# Altium footprint library Footprints.PcbLib: 320 footprints (part 17 of 20)
Each footprint in its own frame and in the unit in brackets; x right, y up, seen from the top. Pads: shape width x height; smd on the part's side, far side on the other; paste and mask are expansions set on the pad; w line width, h text height; cw(c..) or ccw(c..) is an arc to the next point about the centre after c.
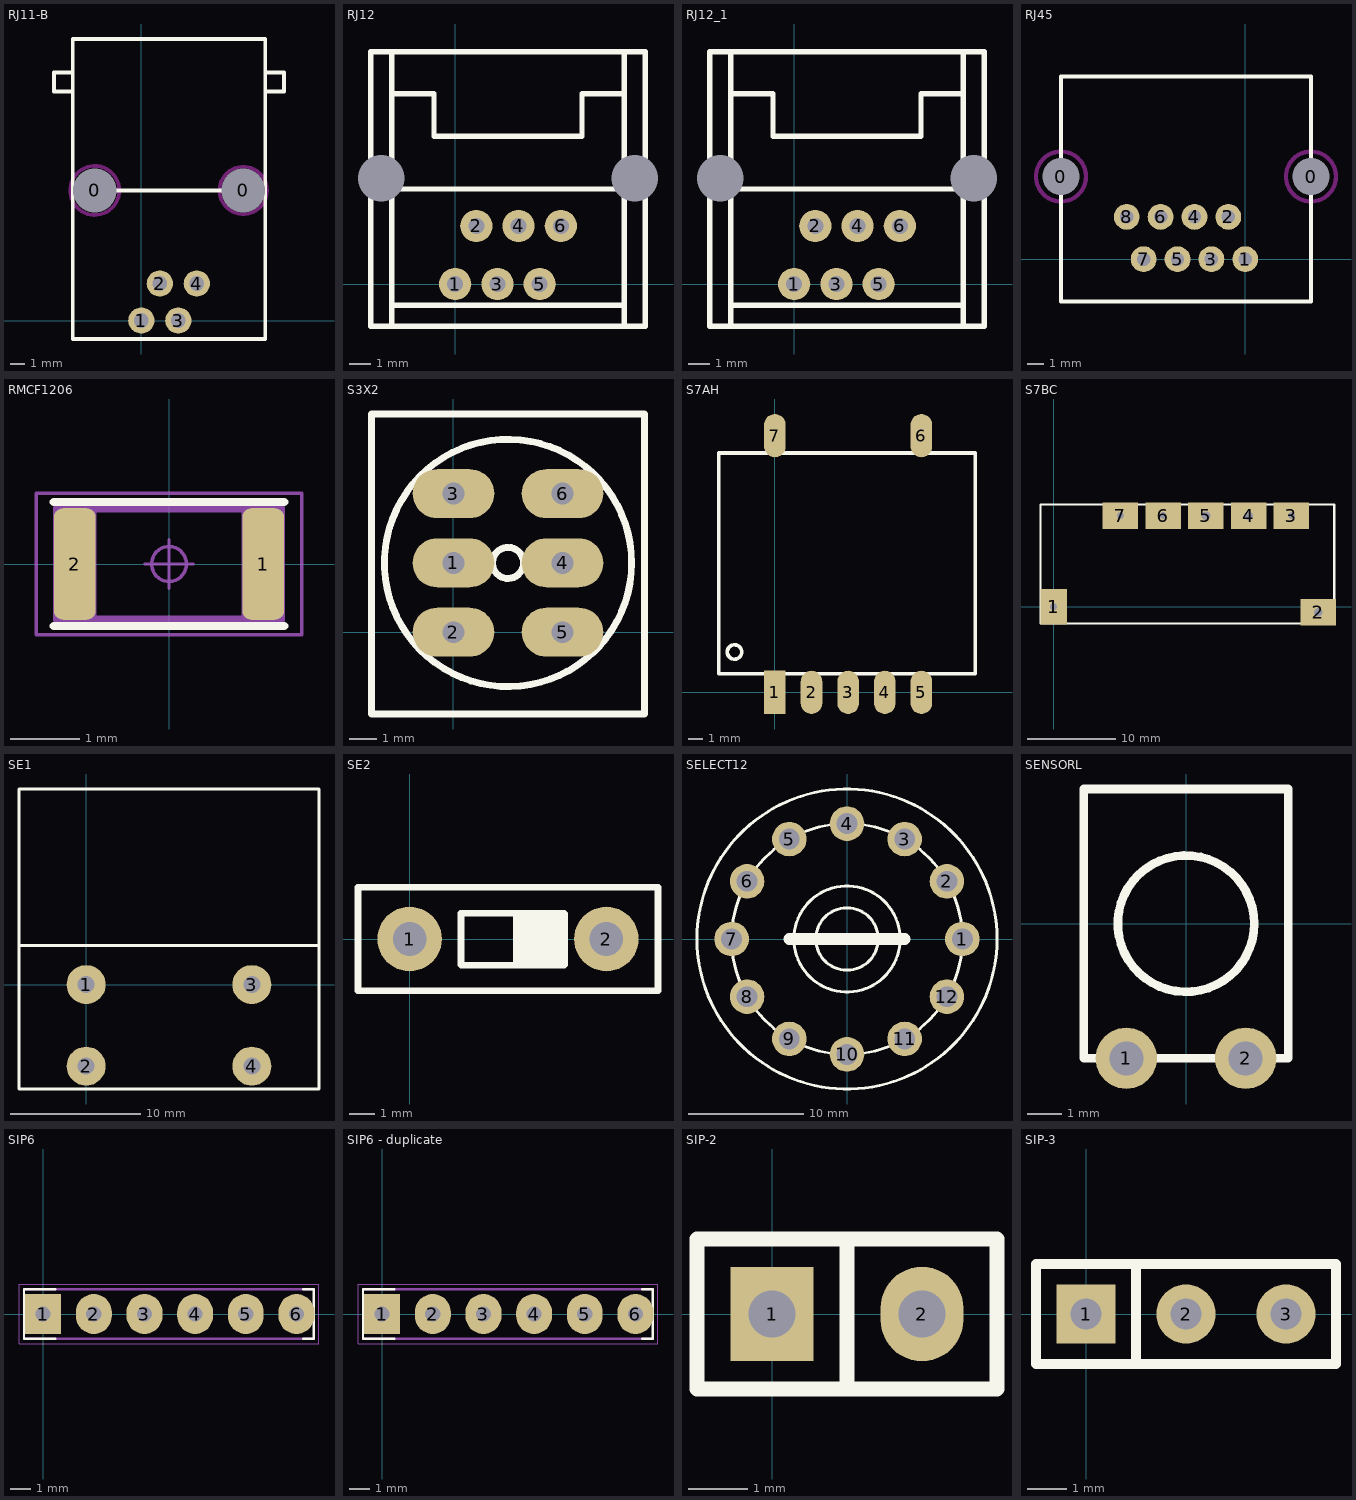
[diagram p16: the footprints below, top view; thin cyan lines are the x and y axes]

## RJ11-B [mm]
pads (6):
  round 2.5 hole 3: 0(-3.2,8.93) 0(7,8.93)
  round 1.8 hole 1: 1(0,0) 2(1.27,2.54) 3(2.54,0) 4(3.81,2.54)
Top Overlay:
  lines w0.254: -4.7,8.93 8.5,8.93 ; -4.7,15.73 -6,15.73 -6,17.03 -4.7,17.03 ; 8.5,15.73 9.8,15.73 9.8,17.03 8.5,17.03 ; -4.7,-1.27 8.5,-1.27 8.5,19.33 -4.7,19.33 -4.7,-1.27
Keep-Out Layer:
  circle w0.254: c7,8.93 r1.631
  circle w0.254: c-3.2,8.93 r1.687

## RJ12 [mil]
pads (8):
  round 60 hole 30: 1(0,0) 2(39.37,108.27) 3(78.74,0) 4(118.11,108.27) 5(157.48,0) 6(196.85,108.27)
  round 0 hole 86.61: ""(-137.8,196.85) ""(334.65,196.85)
Top Overlay:
  lines w10: -157.48,177.17 354.33,177.17 ; -118.11,-78.74 -118.11,433.07 ; -118.11,-39.37 314.96,-39.37 ; -118.11,354.33 -39.37,354.33 -39.37,275.59 236.22,275.59 236.22,354.33 314.96,354.33 ; 314.96,-78.74 314.96,433.07 ; -157.48,-78.74 354.33,-78.74 354.33,433.07 -157.48,433.07 -157.48,-78.74

## RJ12_1 [mil]
pads (8):
  round 60 hole 30: 1(0,0) 2(39.37,108.27) 3(78.74,0) 4(118.11,108.27) 5(157.48,0) 6(196.85,108.27)
  round 0 hole 86.61: ""(-137.8,196.85) ""(334.65,196.85)
Top Overlay:
  lines w10: -157.48,177.17 354.33,177.17 ; -118.11,-78.74 -118.11,433.07 ; -118.11,-39.37 314.96,-39.37 ; -118.11,354.33 -39.37,354.33 -39.37,275.59 236.22,275.59 236.22,354.33 314.96,354.33 ; 314.96,-78.74 314.96,433.07 ; -157.48,-78.74 -157.48,433.07 354.33,433.07 354.33,-78.74 -157.48,-78.74

## RJ45 [mm]
pads (10):
  round 1.524 hole 2.2: 0(-11.056,4.96) 0(3.944,4.96)
  round 1.55 hole 0.8: 1(0,0) 2(-1.016,2.54) 3(-2.032,0) 4(-3.048,2.54) 5(-4.064,0) 6(-5.08,2.54) 7(-6.096,0) 8(-7.112,2.54)
Top Overlay:
  lines w0.254: -11.056,-2.54 3.944,-2.54 3.944,10.96 -11.056,10.96 -11.056,-2.54
Keep-Out Layer:
  circle w0.254: c-11.056,4.96 r1.5
  circle w0.254: c3.944,4.96 r1.5

## RMCF1206 [mm] "Resistor, Chip;3.2mm L X 1.6mm W X 0.55mm, 0.25W H body"
height 0.55
pads (2):
  rrect43% 0.6x1.6 smd: 1(1.35,0) 2(-1.35,0)
Top Overlay:
  lines w0.12: -1.651,-0.889 1.651,-0.889 ; -1.651,0.889 1.651,0.889
Mechanical 13:
  lines w0.12: -1.1,-0.8 -1.1,0.8 ; 1.1,-0.8 1.1,0.8 ; -1.6,-0.8 -1.6,0.8 1.6,0.8 1.6,-0.8 -1.6,-0.8
Mechanical 15:
  circle w0.05: c0,0 r0.25
  lines w0.05: -0.35,0 0.35,0 ; 0,-0.35 0,0.35 ; -1.905,-1.016 -1.905,1.016 1.905,1.016 1.905,-1.016 -1.905,-1.016
3D body: height 0.56, standoff 0, extent 1.101,-0.799 1.599,0.799
3D body: height 0.56, standoff 0, extent -1.599,-0.799 -1.101,0.799
3D body: height 0.55, standoff 0, extent -1.099,-0.799 1.099,0.799

## S3X2 [mm]
pads (6):
  oval 3x1.8 hole 0.8: 1(0,2.54) 2(0,0) 3(0,5.08) 4(4,2.54) 5(4,0) 6(4,5.08)
Top Overlay:
  circle w0.254: c2,2.54 r0.57
  circle w0.254: c2,2.54 r4.533
  lines w0.254: -3,-3 7,-3 7,8 -3,8 -3,-2.99
Mechanical 1:
  lines w0.2: -0.51,5.08 0.49,5.08 ; -0.5,0 0.5,0 ; -0.5,2.54 0.5,2.54 ; 3.49,0 4.49,0 ; 3.49,2.54 4.49,2.54 ; 3.49,5.08 4.49,5.08

## S7AH [mm]
pads (7):
  rect 1.5x3 smd: 1(0,0)
  oval 1.5x3 smd: 2(2.54,0) 3(5.08,0) 4(7.62,0) 5(10.16,0) 6(10.16,17.8) 7(0,17.8)
Top Overlay:
  circle w0.254: c-2.8,2.8 r0.5
  lines w0.254: -3.9,1.3 -3.9,16.6 13.9,16.6 13.9,1.3 -3.9,1.3

## S7BC [mm]
pads (7):
  rect 3x4 hole 0.8: 1(0,0)
  rect 4x3 hole 1: 2(29.91,-0.63) 4(22.03,10.29) 5(17.2,10.29)
  rect 4x3 hole 0.8: 3(26.86,10.29) 6(12.37,10.29) 7(7.54,10.29)
Top Overlay:
  lines w0.254: -1.5,-1.9 -1.5,11.56 31.7,11.56 31.7,-1.9 -1.5,-1.9

## SE1 [mm]
pads (4):
  round 3 hole 1.3: 1(0,0) 2(0,-6.25) 3(12.7,0) 4(12.7,-6.25)
Top Overlay:
  lines w0.254: -5.14,3 17.8,3 17.82,2.98 ; -5.15,-8 17.85,-8 17.85,15 -5.15,15 -5.15,-8

## SE2 [mm]
pads (2):
  round 2.5 hole 1.3: 1(0,0) 2(7.62,0)
Top Overlay:
  rectangle: 4.01,-0.98 5.96,0.94
  lines w0.254: -2,-2 -2,0 -2,2 9.62,2 9.62,-2 -2,-2 ; 1.99,-1 1.99,0.99 5.99,0.99 6,0.98 6,-1 5.99,-1.01 2,-1.01 1.99,-1

## SELECT12 [mm]
pads (12):
  round 3 hole 1.8: 1(10,0) 2(8.66,5) 3(5,8.66) 4(0,10) 5(-5,8.66) 6(-8.66,5) 7(-10,0) 8(-8.66,-5) 9(-5,-8.66) 10(0,-10) 11(5,-8.66) 12(8.66,-5)
Top Overlay:
  circle w0.254: c0,0 r2.7
  circle w0.254: c0,0 r10
  circle w0.254: c0,0 r4.6
  circle w0.254: c0,0 r13
  lines w1: -5,0 5,0

## SENSORL [mm]
pads (2):
  round 1.8 hole 1: 1(-1.75,-3.95) 2(1.75,-3.95)
Top Overlay:
  circle w0.254: c0,0 r2
  lines w0.254: -3,-3.95 -3,3.95 3,3.95 3,-3.95 -3,-3.95

## SIP6 [mm] "SIP, 2.54 mm pitch;6 pin,19.69 mm L X 2.49 mm W X 5.08 mm H body"
height 5.08
pads (6):
  rect 1.8x2 hole 0.76 paste-1.14: 1(0,0)
  oval 1.8x2 hole 0.76 paste-1.14: 2(2.54,0) 3(5.08,0) 4(7.62,0) 5(10.16,0) 6(12.7,0)
Top Overlay:
  lines w0.12: 0.62,-1.25 -0.96,-1.25 -0.96,1.25 0.62,1.25 ; 13.04,-1.25 13.57,-1.25 13.57,1.25 13.04,1.25
Mechanical 13:
  lines w0.001: -0.955,-1.245 -0.955,1.245
  lines w0.12: -0.96,-1.25 8.5,-1.25 ; -0.96,-1.244 -0.96,1.25 8.5,1.25 ; 4.12,-1.25 13.58,-1.25 ; 4.12,1.25 13.58,1.25
Mechanical 15:
  circle w0.05: c0,0 r0.25
  lines w0.05: -0.35,0 0.35,0 ; 0,-0.35 0,0.35 ; 3.87,-1.5 13.83,-1.5 13.83,1.5 3.87,1.5 ; 8.75,-1.5 -1.21,-1.5 -1.21,1.5 8.75,1.5
3D body: height 5.08, standoff 0, extent -1.02,-1.31 13.716,1.31

## SIP6 - duplicate [mm] "SIP, 2.54 mm pitch;6 pin,19.69 mm L X 2.49 mm W X 5.08 mm H body"
height 5.08
pads (6):
  rect 1.8x2 hole 0.76 paste-1.14: 1(0,0)
  oval 1.8x2 hole 0.76 paste-1.14: 2(2.54,0) 3(5.08,0) 4(7.62,0) 5(10.16,0) 6(12.7,0)
Top Overlay:
  lines w0.12: 0.62,-1.25 -0.96,-1.25 -0.96,1.25 0.62,1.25 ; 13.04,-1.25 13.57,-1.25 13.57,1.25 13.04,1.25
Mechanical 13:
  lines w0.001: -0.955,-1.245 -0.955,1.245
  lines w0.12: -0.96,-1.25 8.5,-1.25 ; -0.96,-1.244 -0.96,1.25 8.5,1.25 ; 4.12,-1.25 13.58,-1.25 ; 4.12,1.25 13.58,1.25
Mechanical 15:
  circle w0.05: c0,0 r0.25
  lines w0.05: -0.35,0 0.35,0 ; 0,-0.35 0,0.35 ; 3.87,-1.5 13.83,-1.5 13.83,1.5 3.87,1.5 ; 8.75,-1.5 -1.21,-1.5 -1.21,1.5 8.75,1.5
3D body: height 5.08, standoff 0, extent -1.02,-1.31 13.716,1.31

## SIP-2 [mm]
pads (2):
  rect 1.4x1.6 hole 0.8: 1(0,0)
  oval 1.4x1.6 hole 0.8: 2(2.54,0)
Top Overlay:
  lines w0.254: 1.27,-1.27 1.27,1.27 ; -1.27,-1.27 -1.27,1.27 3.81,1.27 3.81,-1.27 -1.27,-1.27
3D body "hdr-1x2t_2.54_sh7x8.step": height 10.4, standoff -3.6, extent -2.305,-4.4 4.905,3.5

## SIP-3 [mm]
pads (3):
  rect 1.5x1.5 hole 0.8: 1(0,0)
  round 1.5 hole 0.8: 2(2.54,0) 3(5.08,0)
Top Overlay:
  lines w0.254: 1.27,-1.27 1.27,1.27 ; -1.27,-1.27 -1.27,1.27 6.35,1.27 6.35,-1.27 -1.27,-1.27